# EAGLE library part TW-05-02-G-D-157-075 (library TW-05-02-G-D-157-075)
Board to Board & Mezzanine Connectors 2.00 mm Flex Stack, Flexible Board Stacker, Surface Mount Source: Datasheet
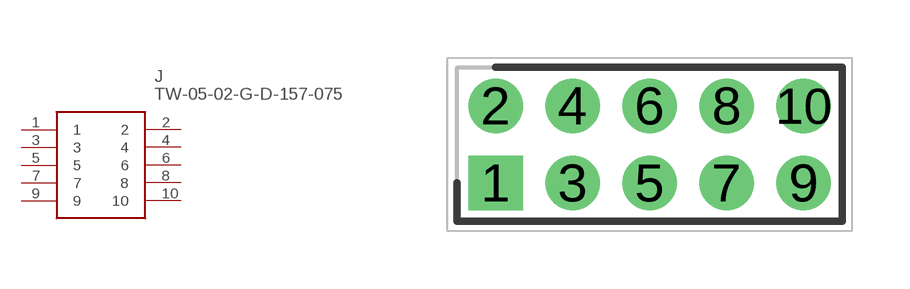
[diagram p0: symbol with the pads of HDRV10W51P200_2X5_1000X400X769; footprint HDRV10W51P200_2X5_1000X400X769]

Designator prefix J

## TW-05-02-G-D-157-075 (Description: Board to Board & Mezzanine Connectors 2.00 mm Flex Stack, Flexible Board Stacker, Surface Mount; Height: 7.694mm; Manufacturer_Name: SAMTEC; Manufacturer_Part_Number: TW-05-02-G-D-157-075; Mouser_Part_Number: 200-TW0502GD157075; Mouser_Price-Stock: https://www.mouser.co.uk/ProductDetail/Samtec/TW-05-02-G-D-157-075?qs=%252BZP6%2F%252BtExtCZO5EqZnHIsg%3D%3D)  [HDRV10W51P200_2X5_1000X400X769]
1  1
2  2
3  3
4  4
5  5
6  6
7  7
8  8
9  9
10  10

## Footprint HDRV10W51P200_2X5_1000X400X769 (pad centres in mm)
TW-05-02-G-D-157-075
drill 0.9 pad 1.35 square: 1 0,0
drill 0.9 pad 1.35: 2 0,2; 3 2,0; 4 2,2; 5 4,0; 6 4,2; 7 6,0; 8 6,2; 9 8,0; 10 8,2